# Altium footprint library Grant_..PcbLib: 73 footprints (part 4 of 5)
Each footprint in its own frame and in the unit in brackets; x right, y up, seen from the top. Pads: shape width x height; smd on the part's side, far side on the other; paste and mask are expansions set on the pad; w line width, h text height; cw(c..) or ccw(c..) is an arc to the next point about the centre after c.
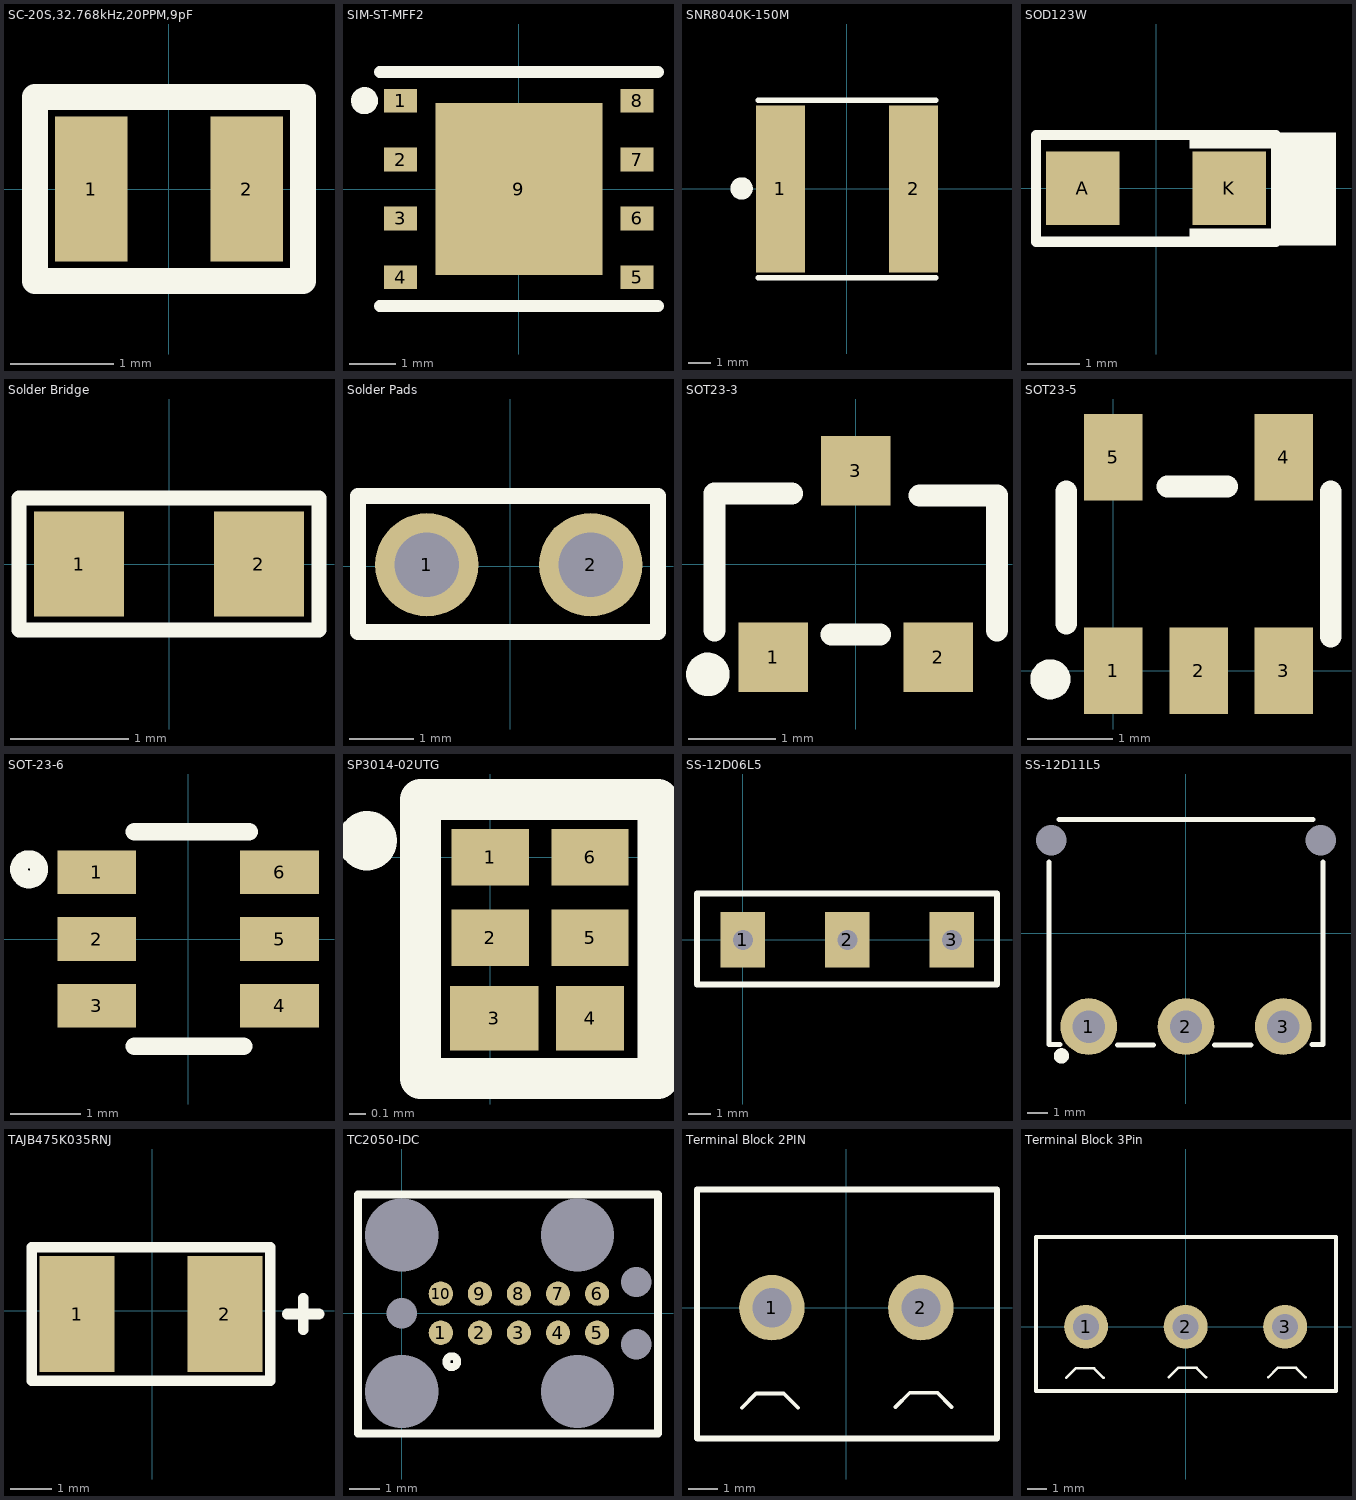
[diagram p3: the footprints below, top view; thin cyan lines are the x and y axes]

## SC-20S,32.768kHz,20PPM,9pF [mm]
pads (2):
  rect 0.7x1.4 smd: 1(-0.75,0) 2(0.75,0)
Top Overlay:
  lines w0.254: -1.295,-0.889 1.295,-0.889 1.295,0.889 -1.295,0.889 -1.295,-0.889
3D body "module.stp": height 0.57, standoff -0.03, extent -1.025,-0.6 1.025,0.6

## SIM-ST-MFF2 [mm]
pads (9):
  rect 0.71x0.51 smd: 1(-2.55,1.905) 2(-2.55,0.635) 3(-2.55,-0.635) 4(-2.55,-1.905) 5(2.55,-1.905) 6(2.55,-0.635) 7(2.55,0.635) 8(2.55,1.905)
  rect 3.6x3.7 smd: 9(0,0)
Top Overlay:
  circle w0.3: c-3.327,1.905 r0.141
  lines w0.254: -3,-2.525 3,-2.525 ; -3,2.525 3,2.525
Top Paste:
  region: 0.18,-0.18 1.5,-0.18 1.5,-1.45 0.18,-1.45
  region: -1.5,-0.18 -0.18,-0.18 -0.18,-1.45 -1.5,-1.45
  region: 0.18,1.45 1.5,1.45 1.5,0.18 0.18,0.18
  region: -1.5,1.45 -0.18,1.45 -0.18,0.18 -1.5,0.18
3D body "SIM-ST-MFF2--3DModel-STEP-56544.STEP": height 0.82, standoff 0, extent -3,-2.5 3,2.5

## SNR8040K-150M [mm]
pads (2):
  rect 2.22x7.52 smd: 1(-3,0) 2(3,0)
Top Overlay:
  circle w0.5: c-4.75,0.025 r0.254
  lines w0.254: -4,-4 0,-4 4,-4 ; -4,4 0,4 4,4

## SOD123W [mm] "DIODE SCHOTTKY 30V 1A SOD123W"
pads (2):
  rect 1.4x1.4 smd: A(-1.4,0) K(1.4,0)
Top Overlay:
  region: 2.286,1.016 0.635,1.016 0.635,0.762 2.286,0.762
  region: 2.286,-0.762 0.635,-0.762 0.635,-1.016 2.286,-1.016
  region: 3.429,1.067 2.286,1.067 2.286,-1.092 3.429,-1.092
  lines w0.2: -2.286,-1.016 -2.286,1.016 -1.143,1.016 1.27,1.016 2.286,1.016 2.286,-1.016 -2.286,-1.016
3D body "User Library-SOD123W.step": height 1.1, standoff -0.01, extent -2,-0.95 2,0.95

## Solder Bridge [mil] "Solder Bridge ON"
pads (2):
  rect 30x35 smd: 1(-30,0) 2(30,0)
Top Overlay:
  lines w5: -50,-22 -50,22 50,22 50,-22 -50,-22

## Solder Pads [mm] "SMD-0402"
pads (2):
  round 1.6 hole 1: 1(-1.295,0.025) 2(1.245,0.025)
Top Overlay:
  lines w0.254: -2.362,-1.016 2.286,-1.016 2.286,1.092 -2.362,1.092 -2.362,-1.016

## SOT23-3 [mm] "SOT23, 3-Leads, Body 2.9x1.3mm, Pitch 0.95mm, Lead Span 2.3mm - Reverse Pinning, IPC High Density"
height 1.1
pads (3):
  rect 0.8x0.8 smd: 1(-0.95,-1.075) 2(0.95,-1.075) 3(0,1.075)
Top Overlay:
  circle w0.25: c-1.702,-1.27 r0.125
  lines w0.254: -1.626,-0.762 -1.626,0.813 -0.737,0.813 ; -0.28,-0.813 0.279,-0.813 ; 0.736,0.787 1.625,0.787 1.625,-0.762
3D body "CircuitWorks-SOT-23.step": height 1.05, standoff -0.05, extent -1.5,-1.25 1.5,1.25

## SOT23-5 [mil] "SOT23-5 Package"
height 51.18
pads (5):
  rect 27x40 smd: 1(0,0) 2(39.37,0) 3(78.74,0) 4(78.74,98.43) 5(0,98.43)
Top Overlay:
  circle w10: c-29,-4 r4.24
  lines w10: -21.65,21.65 -21.65,82.68 ; 25,85 52.56,85 ; 100.39,15.75 100.39,82.68
3D body "User Library-SOT-23-5-1.STEP": height 43.31, standoff -0.06, extent -20.55,3.29 97.56,101.72

## SOT-23-6 [mm] "IC BAT CHG LI-ION 1 CELL SOT23-6"
pads (6):
  rect 1.12x0.62 smd: 1(-1.3,0.95) 2(-1.3,0) 3(-1.3,-0.95) 4(1.3,-0.95) 5(1.3,0) 6(1.3,0.95)
Top Overlay:
  circle w0.254: c-2.261,0.991 r0.144
  lines w0.254: -0.762,-1.524 0.787,-1.524 ; -0.762,1.524 0.864,1.524
3D body "User Library-SOT23-6-2.step": height 1.44, standoff -0.01, extent -1.4,-1.45 1.4,1.45

## SP3014-02UTG [mm]
pads (6):
  rect 0.48x0.35 smd: 1(0,0) 2(0,-0.5) 5(0.62,-0.5) 6(0.62,0)
  rect 0.55x0.4 smd: 3(0.025,-1)
  rect 0.42x0.4 smd: 4(0.62,-1)
Top Overlay:
  circle w0.254: c-0.762,0.102 r0.057
  lines w0.254: -0.432,-1.372 1.041,-1.372 1.041,0.356 -0.432,0.356 -0.432,-1.372

## SS-12D06L5 [mm]
pads (3):
  rect 2x2.5 hole 0.9 square: 1(0,0) 2(4.7,0) 3(9.4,0)
Top Overlay:
  lines w0.254: -2.057,-2.007 11.43,-2.007 11.43,2.083 -2.057,2.083 -2.057,-2.007

## SS-12D11L5 [mm]
pads (5):
  round 2.8 hole 1.6: 1(-4.8,-4.6) 2(0,-4.6) 3(4.8,-4.6)
  round 0 hole 1.5 unplated: MH1(-6.65,4.6) MH2(6.65,4.6)
Top Overlay:
  circle w0.5: c-6.147,-6.045 r0.127
  lines w0.254: -6.756,3.505 -6.756,-5.486 -6.223,-5.486 ; -6.274,5.613 6.274,5.613 ; -3.378,-5.512 -1.6,-5.512 ; 1.422,-5.512 3.2,-5.512 ; 6.223,-5.486 6.756,-5.486 6.756,3.505
3D body "User Library-1103M2S3ABE2.step": height 6.85, standoff -3.15, extent -6.65,-5.389 6.7,10.303

## TAJB475K035RNJ [mil]
pads (2):
  rect 70.87x110 smd: 1(-71,-3) 2(69,-3)
Top Overlay:
  lines w10: 128,-3 158,-3 ; 143,-18 143,12 ; -114,-66 112,-66 112,60 -114,60 -114,-66
3D body "User Library-AVX_BCASE.step": height 76.93, standoff -2.99, extent -73.84,-60.68 71.83,54.68

## TC2050-IDC [mil] "CBL PLUG-OF-NAILS 10-PIN W/LEGS"
pads (17):
  round 30.98 smd: 1(50,-25) 2(100,-25) 3(150,-25) 4(200,-25) 5(250,-25) 6(250,25) 7(200,25) 8(150,25) 9(100,25) 10(50,25)
  round 0 hole 93.5: MP1(0,-100) MP2(225,-100) MP3(225,100) MP4(0,100)
  round 0 hole 39.02: MP5(0,0) MP6(300,-39.96) MP7(300,39.96)
Top Overlay:
  circle w10: c64,-62 r7
  lines w10: -56,-154 328,-154 328,152 -56,152 -56,-154

## Terminal Block 2PIN [mm]
pads (2):
  round 2.2 hole 1.32: 1(-2.5,0)
  round 2.2 hole 1.3: 2(2.5,0)
Top Overlay:
  lines w0.127: -3.507,-3.358 -3.03,-2.881 -2.102,-2.881 -1.625,-3.358 ; 1.65,-3.332 2.126,-2.856 3.055,-2.856 3.531,-3.332
  lines w0.2: -5.016,3.962 -5.016,0 -5.016,-4.382 -5.004,-4.394 5.055,-4.394 5.055,0.01 5.055,3.972 -5.016,3.972
3D body "1935161--3DModel-STEP-56544.STEP": height 11.5, standoff -3.4, extent -5,-5.112 5.4,3.888

## Terminal Block 3Pin [mm]
pads (3):
  round 2.2 hole 1.32: 1(-5,0)
  round 2.2 hole 1.3: 2(0,0) 3(5,0)
Top Overlay:
  lines w0.127: -6.007,-2.57 -5.53,-2.094 -4.602,-2.094 -4.125,-2.57 ; -0.85,-2.545 -0.374,-2.068 0.555,-2.068 1.031,-2.545 ; 4.15,-2.545 4.626,-2.068 5.555,-2.068 6.031,-2.545
  lines w0.2: -7.516,-3.23 7.555,-3.23 7.555,0.01 7.555,4.506 -7.516,4.506 -7.516,0 -7.516,-3.23
3D body "tb5p-3p_p5_l15_w7-6_h10.stp": height 10.2, standoff -3.9, extent -8.1,-3.151 7.5,4.449